# Altium footprint library CANduino.PcbLib: 2 footprints
Each footprint in its own frame and in the unit in brackets; x right, y up, seen from the top. Pads: shape width x height; smd on the part's side, far side on the other; paste and mask are expansions set on the pad; w line width, h text height; cw(c..) or ccw(c..) is an arc to the next point about the centre after c.
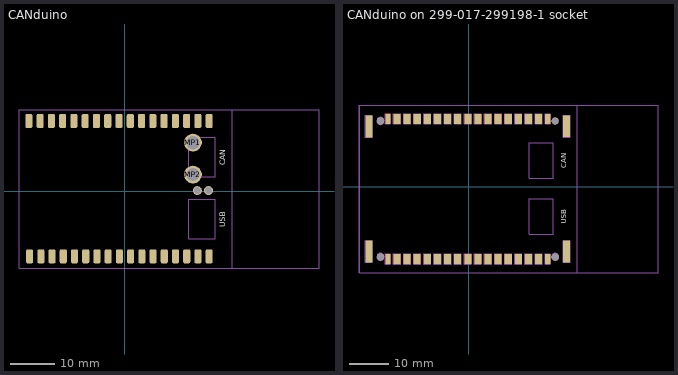
[diagram p0: the footprints below, top view; thin cyan lines are the x and y axes]

## CANduino [mm]
pads (38):
  rrect50% 1.6x3.2 smd: 1(19.05,15.875) 2(16.51,15.875) 3(13.97,15.875) 4(11.43,15.875) 5(8.89,15.875) 6(6.35,15.875) 7(3.81,15.875) 8(1.27,15.875) 9(-1.27,15.875) 10(-3.81,15.875) 11(-6.35,15.875) 12(-8.89,15.875) 13(-11.43,15.875) 14(-13.97,15.875) 15(-16.51,15.875) 16(-19.05,15.875) 17(-21.59,15.875) 18(-21.41,-14.63) 19(-18.881,-14.63) 20(-16.352,-14.63) 21(-13.824,-14.63) 22(-11.295,-14.63) 23(-8.766,-14.63) 24(-6.237,-14.63) 25(-3.709,-14.63) 26(-1.18,-14.63) 27(1.349,-14.63) 28(3.878,-14.63) 29(6.406,-14.63) 30(8.935,-14.63) 31(11.464,-14.63) 32(13.993,-14.63) 33(16.521,-14.63) 34(19.05,-14.63)
  round 4 hole 3: MP1(15.4,11) MP2(15.4,3.8)
  round 2 hole 1.5: MP3(18.9,0.2) MP4(16.4,0.2)
Top Overlay:
  text "USB" at 22.636,-8.061 h1.27
  text "CAN" at 22.636,5.876 h1.27
Mechanical 1:
  lines w0.254: -23.8,-17.3 24.2,-17.3 24.2,18.4 -23.8,18.4 -23.8,-17.3 ; 14.4,-10.7 20.4,-10.7 20.4,-1.8 14.4,-1.8 14.4,-10.7 ; 14.4,3.3 20.4,3.3 20.4,12.2 14.4,12.2 14.4,3.3
  text "CAN-PORT" at 18.7,4.001 h1
  text "USB-PORT" at 18.5,-9.978 h1
Top Courtyard:
  lines w0.254: -23.8,-17.3 43.8,-17.3 43.8,18.4 -23.8,18.4 -23.8,-17.3
3D body "CANduino.step": height 10.29, standoff -0.48, extent -22.6,-14.6 20.4,15.9

## CANduino on 299-017-299198-1 socket [mil]
pads (42):
  rect 50.79x100 smd: 1(780,670) 17(-800,670) 18(-800.11,-714.83) 34(780,-715)
  rect 70.08x100 smd: 2(690,670) 3(590,670) 4(490,670) 5(390,670) 6(290,670) 7(190,670) 8(90,670) 9(-10,670) 10(-110,670) 11(-210,670) 12(-310,670) 13(-410,670) 14(-510,670) 15(-610,670) 16(-710,670) 19(-709.78,-714.61) 20(-610.61,-715.01) 21(-510.24,-715.41) 22(-410,-715) 23(-310,-715) 24(-210,-715) 25(-110,-715) 26(-10,-715) 27(90,-715) 28(190,-715) 29(290,-715) 30(390,-716) 31(490,-715) 32(590,-715) 33(689,-715)
  round 70.87 hole 70.87 unplated: 35(-873,649) 36(-873,-695) 37(854,-695) 38(853.39,649)
  rect 68.9x216.54 smd: MP1(966.54,596.46) MP2(-987.2,595.47) MP3(-987.2,-642.72) MP4(966.54,-641.73)
Top Layer:
  rectangle: -826.02,619.63 -774.65,720.27
  rectangle: -745,620 -675,720
  rectangle: -645,620 -575,720
  rectangle: -545,620 -475,720
  rectangle: -445,620 -375,720
  rectangle: -45,620 25,720
  rectangle: 55,620 125,720
  rectangle: 155,620 225,720
  rectangle: 255,620 325,720
  rectangle: 555,620 625,720
  rectangle: 655,620 725,720
  rectangle: 755,620 805.71,720
  rectangle: -345,620 -275,720
  rectangle: -245,620 -175,720
  rectangle: -145,620 -75,720
  rectangle: 355,620 425,720
  rectangle: 455,620 525,720
  rectangle: 755,-765 805.71,-665
  rectangle: 655,-765 725,-665
  rectangle: 555,-765 625,-665
  rectangle: 455,-765 525,-665
  rectangle: 355,-765 425,-665
  rectangle: 255,-765 325,-665
  rectangle: 155,-765 225,-665
  rectangle: 55,-765 125,-665
  rectangle: -45,-765 25,-665
  rectangle: -145,-765 -75,-665
  rectangle: -245,-765 -175,-665
  rectangle: -345,-765 -275,-665
  rectangle: -445,-765 -375,-665
  rectangle: -545,-765 -475,-665
  rectangle: -645,-765 -575,-665
  rectangle: -745,-765 -675,-665
  rectangle: -826.02,-765.37 -774.65,-664.73
Top Overlay:
  text "CAN" at 964.8,181.32 h50
  text "USB" at 964.8,-367.36 h50
Mechanical 1:
  drawing of 235 lines, arcs and shapes, not listed
  text "USB-PORT" at 759.84,-440.07 h39.37
  text "CAN-PORT" at 767.72,110.27 h39.37
Top Courtyard:
  lines w10: -1082.68,-850.39 1870.08,-850.39 1870.08,803.15 -1082.68,803.15 -1082.68,-850.39
3D body "299-017-299-198 - EDAC SMT Card Edge Connector.STEP": height 318.9, standoff -59.06, extent -1004,395.14 979.46,760.86
3D body "CANduino.step": height 515.35, standoff 91.34, extent -857.28,-627.95 835.63,572.83
3D body "299-017-299-198 - EDAC SMT Card Edge Connector.STEP": height 318.9, standoff -59.06, extent -1001,-803.86 982.46,-438.14